# Altium footprint library OSRAM_SFH4715B_Altium_Import_v3.PCBLIB: 1 footprints
Each footprint in its own frame and in the unit in brackets; x right, y up, seen from the top. Pads: shape width x height; smd on the part's side, far side on the other; paste and mask are expansions set on the pad; w line width, h text height; cw(c..) or ccw(c..) is an arc to the next point about the centre after c.
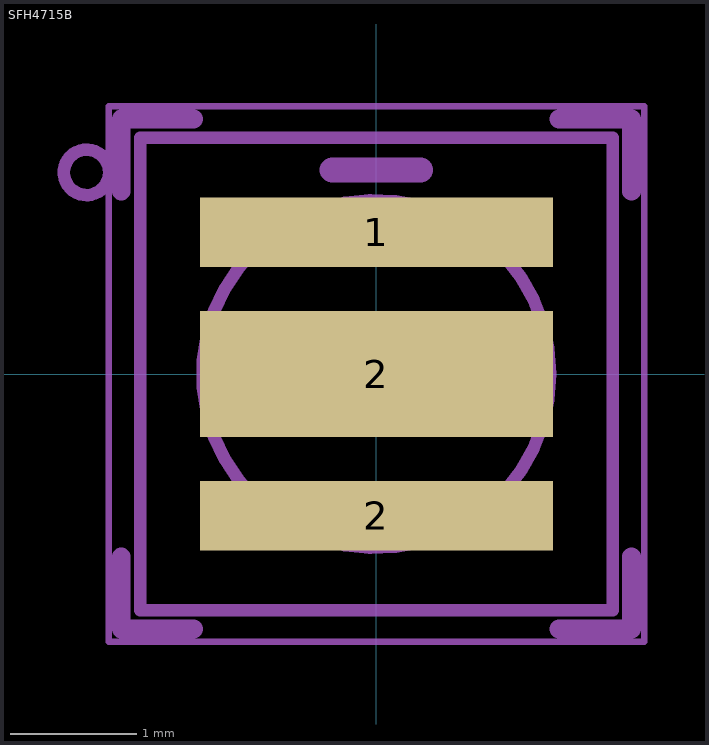
[diagram p0: the footprint, top view; thin cyan lines are the x and y axes]

## SFH4715B [mm]
pads (3):
  rect 2.8x0.55 smd paste+0 mask+0: 1(0,1.125) 2(0,-1.125)
  rect 2.8x1 smd paste+0 mask+0: 2(0,0)
Top Paste:
  region: -1.3,0.9 -1.3,1.3 1.3,1.3 1.3,0.9
  region: -1.3,-0.45 -1.3,0.45 -0.15,0.45 -0.15,-0.45
  region: 0.15,-0.45 0.15,0.45 1.3,0.45 1.3,-0.45
  region: -1.3,-1.3 -1.3,-0.9 1.3,-0.9 1.3,-1.3
Top Solder:
  region: -1.4,0.85 -1.4,1.4 1.4,1.4 1.4,0.85
  region: -1.4,-0.5 -1.4,0.5 1.4,0.5 1.4,-0.5
  region: -1.4,-1.4 -1.4,-0.85 1.4,-0.85 1.4,-1.4
tDocu:
  circle w0.1: c0,0 r1.38
  lines w0.1: -1.875,-1.875 1.875,-1.875 1.875,1.875 -1.875,1.875 -1.875,-1.875
  lines w0.2: -0.35,1.62 0.35,1.62
tPlace:
  circle w0.1: c-2.3,1.6 r0.18
  lines w0.15: -2.025,-1.45 -2.025,-2.025 -1.45,-2.025 ; -2.025,1.45 -2.025,2.025 -1.45,2.025 ; 1.45,-2.025 2.025,-2.025 2.025,-1.45 ; 1.45,2.025 2.025,2.025 2.025,1.45
ReferenceLC:
  lines w0.05: -2.125,-2.125 2.125,-2.125 2.125,2.125 -2.125,2.125 -2.125,-2.125